# Altium footprint library SZMMSZ5234BT1G.PcbLib: 1 footprints
Each footprint in its own frame and in the unit in brackets; x right, y up, seen from the top. Pads: shape width x height; smd on the part's side, far side on the other; paste and mask are expansions set on the pad; w line width, h text height; cw(c..) or ccw(c..) is an arc to the next point about the centre after c.
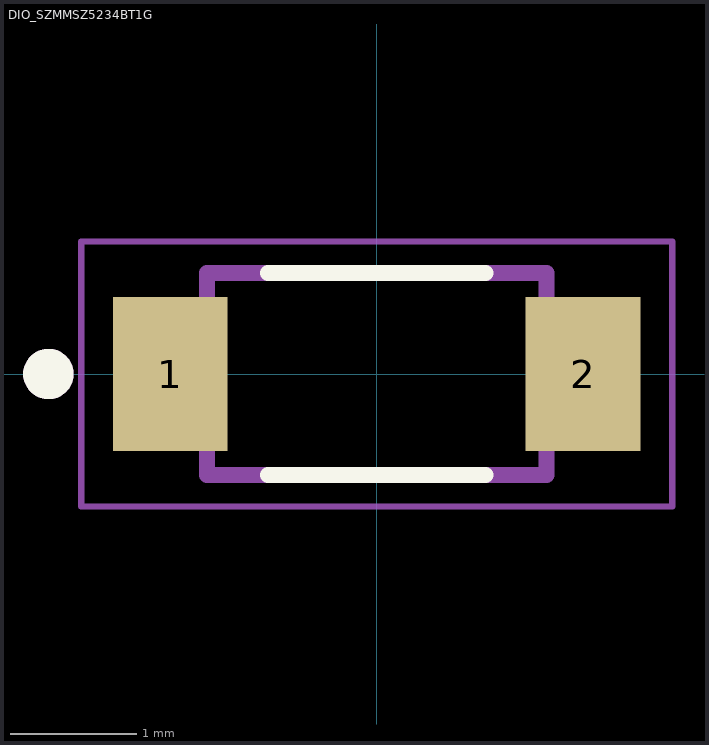
[diagram p0: the footprint, top view; thin cyan lines are the x and y axes]

## DIO_SZMMSZ5234BT1G [mm]
height 1.35
pads (2):
  rect 0.91x1.22 smd paste+0 mask+0.102: 1(-1.635,0) 2(1.635,0)
Top Overlay:
  circle w0.2: c-2.6,0 r0.1
  lines w0.127: -0.86,-0.8 0.86,-0.8 ; -0.86,0.8 0.86,0.8
Assembly Top:
  circle w0.2: c-2.6,0 r0.1
  lines w0.127: -1.345,-0.8 1.345,-0.8 1.345,0.8 -1.345,0.8 -1.345,-0.8
Courtyard Top:
  lines w0.05: -2.34,-1.05 -2.34,1.05 2.34,1.05 2.34,-1.05 -2.34,-1.05
3D body "SZMMSZ5234BT1G.step": height 1.35, standoff 0, extent -1.84,-0.8 1.84,0.8